# Altium footprint library TO-252-3(DPAK).PcbLib: 1 footprints
Each footprint in its own frame and in the unit in brackets; x right, y up, seen from the top. Pads: shape width x height; smd on the part's side, far side on the other; paste and mask are expansions set on the pad; w line width, h text height; cw(c..) or ccw(c..) is an arc to the next point about the centre after c.
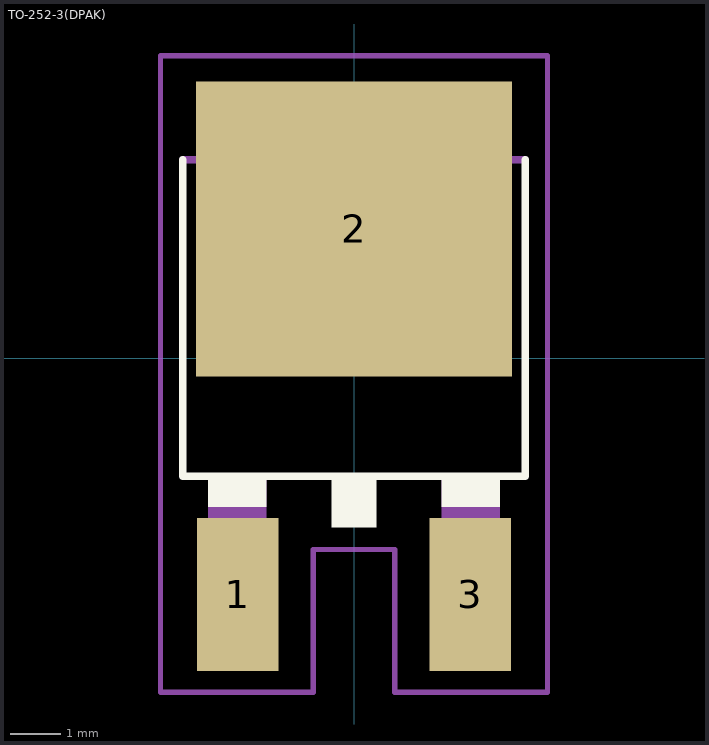
[diagram p0: the footprint, top view; thin cyan lines are the x and y axes]

## TO-252-3(DPAK) [mm]
pads (3):
  rect 1.6x3 smd: 1(-2.286,-4.64) 3(2.286,-4.64)
  rect 6.2x5.8 smd: 2(0,2.54)
Top Overlay:
  region: 2.86,-2.92 1.72,-2.92 1.72,-2.32 2.86,-2.32
  region: -1.72,-2.92 -2.86,-2.92 -2.86,-2.32 -1.72,-2.32
  region: 0.44,-3.32 -0.44,-3.32 -0.44,-2.32 0.44,-2.32
  lines w0.152: -3.365,3.9 -3.365,-2.32 3.365,-2.32 3.365,3.9
Mechanical 13:
  region: 2.86,-5.22 1.72,-5.22 1.72,-2.32 2.86,-2.32
  region: -1.72,-5.22 -2.86,-5.22 -2.86,-2.32 -1.72,-2.32
  region: 2.72,4.53 2.72,3.9 -2.73,3.9 -2.73,4.53 -2.09,5.17 2.08,5.17
  lines w0.152: -3.365,3.9 -2.72,3.9 ; 2.72,3.9 3.365,3.9 ; -2.725,-0.025 -2.725,3.905 2.725,3.905 2.725,-0.025 -2.725,-0.025
Mechanical 15:
  lines w0.102: -3.8,-6.56 -0.8,-6.56 -0.8,-3.76 0.8,-3.76 0.8,-6.56 3.8,-6.56 3.8,5.94 -3.8,5.94 -3.8,-6.56
3D body "step_temp.STEP": height 2.39, standoff 0, extent -4.955,-3.29 4.955,3.29